# Altium schematic symbol library SKQYACE010.SchLib: 1 symbol
Pins are listed as number, name and electrical type; pins without a type are passive.

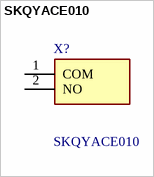
[diagram p0: symbol SKQYACE010]

## SKQYACE010
designator X?
6.13.7mm Compact High-speed Mounting Type (Surface Mount) SKQY Series; Manufacturer_Name: ALPS Electric; Geometry.Height: 2.7mm; On Line Components Part Number: *; On Line Components Price/Stock: *; Manufacturer_Part_Number: SKQYACE010; Datasheet Link: https://tech.alpsalpine.com/e/products/detail/SKQYACE010/
footprint SKQYACE010
pins: 1 COM, 2 NO